# Altium footprint library SamacSys.PcbLib: 1008 footprints (part 36 of 63)
Each footprint in its own frame and in the unit in brackets; x right, y up, seen from the top. Pads: shape width x height; smd on the part's side, far side on the other; paste and mask are expansions set on the pad; w line width, h text height; cw(c..) or ccw(c..) is an arc to the next point about the centre after c.
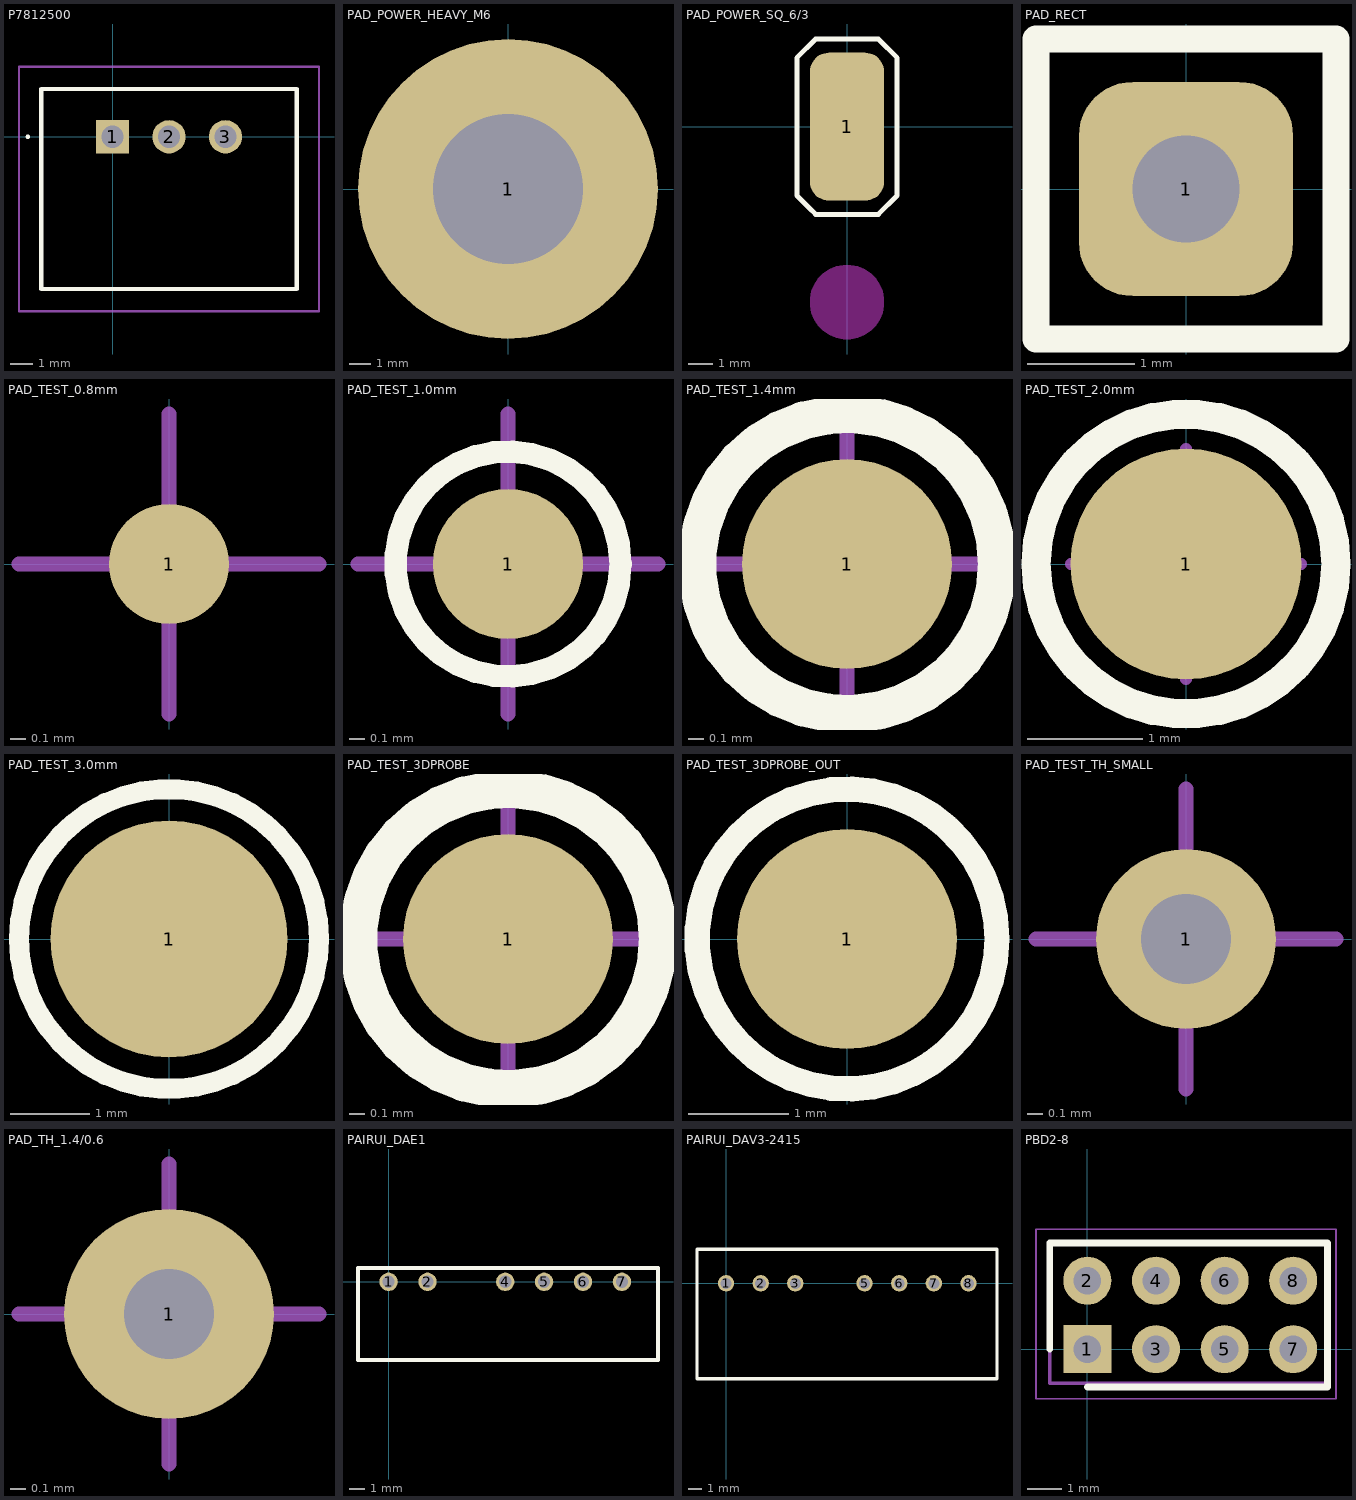
[diagram p35: the footprints below, top view; thin cyan lines are the x and y axes]

## P7812500 [mm]
height 19
pads (3):
  rect 1.5x1.5 hole 1: 1(0,0)
  round 1.5 hole 1: 2(2.54,0) 3(5.08,0)
Top Overlay:
  lines w0.1: -3.86,0 cw(c-3.81,0) -3.76,0 cw(c-3.81,0) -3.86,0
  lines w0.2: -3.21,-6.85 -3.21,2.15 8.29,2.15 8.29,-6.85 -3.21,-6.85
Assembly:
  lines w0.1: -3.21,-6.85 -3.21,2.15 8.29,2.15 8.29,-6.85 -3.21,-6.85
Countryard:
  lines w0.1: -4.21,-7.85 -4.21,3.15 9.29,3.15 9.29,-7.85 -4.21,-7.85
3D body "P7812-500.stp": height 18.1, standoff -5, extent -3.21,-6.85 8.29,2.15

## PAD_POWER_HEAVY_M6 [mm]
pads (1):
  round 14 hole 7 mask+0.2: 1(0,0)
Countryard:
  lines w0.1: -1,0 1,0 ; 0,-1 0,1

## PAD_POWER_SQ_6/3 [mm]
pads (1):
  rrect50% 3x6 smd: 1(0,0)
Top Overlay:
  lines w0.2: -2.032,-2.794 -1.54,-3.286 -1.27,-3.556 1.27,-3.556 2.032,-2.794 2.032,2.794 1.27,3.556 -1.27,3.556 -2.032,2.794 -2.032,-2.794
Keep-Out Layer:
  board cut-out: -1.5,-7.112 -1.5,-7.26 -1.442,-7.55 -1.329,-7.823 -1.165,-8.068 -0.956,-8.277 -0.711,-8.441 -0.438,-8.554 -0.148,-8.612 0,-8.612 0.148,-8.612 0.438,-8.554 0.711,-8.441 0.956,-8.277 1.165,-8.068 1.329,-7.823 1.442,-7.55 1.5,-7.26 1.5,-7.112 1.5,-6.964 1.442,-6.674 1.329,-6.401 1.165,-6.156 0.956,-5.947 0.711,-5.783 0.438,-5.67 0.148,-5.612 0,-5.612 -0.148,-5.612 -0.438,-5.67 -0.711,-5.783 -0.956,-5.947 -1.165,-6.156 -1.329,-6.401 -1.442,-6.674 -1.5,-6.964
Countryard:
  lines w0.1: -1,0 1,0 ; 0,-1 0,1

## PAD_RECT [mm]
pads (1):
  rrect50% 2x2 hole 1: 1(0,0)
Top Overlay:
  lines w0.254: -1.4,-1.4 -1.4,1.4 1.4,1.4 1.4,-1.4 -1.4,-1.4

## PAD_TEST_0.8mm [mm]
pads (1):
  round 0.8 smd paste-100: 1(0,0)
Countryard:
  lines w0.1: -1,0 1,0 ; 0,-1 0,1

## PAD_TEST_1.0mm [mm]
pads (1):
  round 1 smd paste-100: 1(0,0)
Top Overlay:
  circle w0.15: c0,0 r0.75
Countryard:
  lines w0.1: -1,0 1,0 ; 0,-1 0,1

## PAD_TEST_1.4mm [mm]
pads (1):
  round 1.4 smd paste-100: 1(0,0)
Top Overlay:
  circle w0.254: c0,0 r1
Countryard:
  lines w0.1: -1,0 1,0 ; 0,-1 0,1

## PAD_TEST_2.0mm [mm]
pads (1):
  round 2 smd paste-100: 1(0,0)
Top Overlay:
  circle w0.254: c0,0 r1.3
Countryard:
  lines w0.1: -1,0 1,0 ; 0,-1 0,1

## PAD_TEST_3.0mm [mm]
pads (1):
  round 3 smd paste-100: 1(0,0)
Top Overlay:
  circle w0.254: c0,0 r1.9
Countryard:
  lines w0.1: -1,0 1,0 ; 0,-1 0,1

## PAD_TEST_3DPROBE [mm]
pads (1):
  round 1.4 smd paste-100: 1(0,0)
Top Overlay:
  circle w0.254: c0,0 r1
Countryard:
  lines w0.1: -1,0 1,0 ; 0,-1 0,1
3D body "P100-E3.STEP": height 33.3, standoff -0.05, extent -0.893,-0.9 0.894,0.9

## PAD_TEST_3DPROBE_OUT [mm]
pads (1):
  round 2.2 smd paste-100: 1(0,0)
Top Overlay:
  circle w0.254: c0,0 r1.5
Countryard:
  lines w0.1: -1,0 1,0 ; 0,-1 0,1
3D body "P100-E3.STEP": height 33.35, standoff 0, extent -0.893,-0.9 0.894,0.9

## PAD_TEST_TH_SMALL [mm]
pads (1):
  round 1.2 hole 0.6 paste-2539.97: 1(0,0)
Countryard:
  lines w0.1: -1,0 1,0 ; 0,-1 0,1

## PAD_TH_1.4/0.6 [mm]
pads (1):
  round 1.4 hole 0.6 paste-2539.97: 1(0,0)
Countryard:
  lines w0.1: -1,0 1,0 ; 0,-1 0,1

## PAIRUI_DAE1 [mm]
height 10.6
pads (6):
  round 1.2 hole 0.8: 1(0,0) 2(2.54,0) 4(7.62,0) 5(10.16,0) 6(12.7,0) 7(15.24,0)
Top Overlay:
  lines w0.254: -2,-5.1 -2,0.9 17.6,0.9 17.6,-5.1 -2,-5.1
Top Designator:
  text ".Designator" at 1.272,-1.905 h1.52
3D body: height 10, standoff 0, extent -2,-5.1 17.6,0.9

## PAIRUI_DAV3-2415 [mm]
height 10.6
pads (7):
  round 1.2 hole 0.8: 1(0,0) 2(2.54,0) 3(5.08,0) 5(10.16,0) 6(12.7,0) 7(15.24,0) 8(17.78,0)
Top Overlay:
  lines w0.254: -2.13,-7 19.87,-7 19.87,2.5 -2.13,2.5 -2.13,-7
Top Designator:
  text ".Designator" at 1.272,-1.905 h1.52
3D body "SIP-8.step": height 11.1, standoff -3.6, extent -2.03,-6.7 19.77,2.5

## PBD2-8 [mm]
pads (8):
  rect 1.4x1.4 hole 0.8: 1(0,0)
  round 1.4 hole 0.8: 2(0,2) 3(2,0) 4(2,2) 5(4,0) 6(4,2) 7(6,0) 8(6,2)
Top Overlay:
  lines w0.2: -1.1,0 -1.1,3.1 7,3.1 7,-1.1 0,-1.1
Assembly:
  lines w0.1: -1.1,-1 -1.1,3.1 7,3.1 7,-1 -1.1,-1
Countryard:
  lines w0.05: -1.5,-1.45 -1.5,3.5 7.25,3.5 7.25,-1.45 -1.5,-1.45
3D body "PBD2-8.step": height 6.35, standoff -3, extent -1,-1 7,3